# Altium footprint library Connectors.PcbLib: 120 footprints (part 4 of 8)
Each footprint in its own frame and in the unit in brackets; x right, y up, seen from the top. Pads: shape width x height; smd on the part's side, far side on the other; paste and mask are expansions set on the pad; w line width, h text height; cw(c..) or ccw(c..) is an arc to the next point about the centre after c.
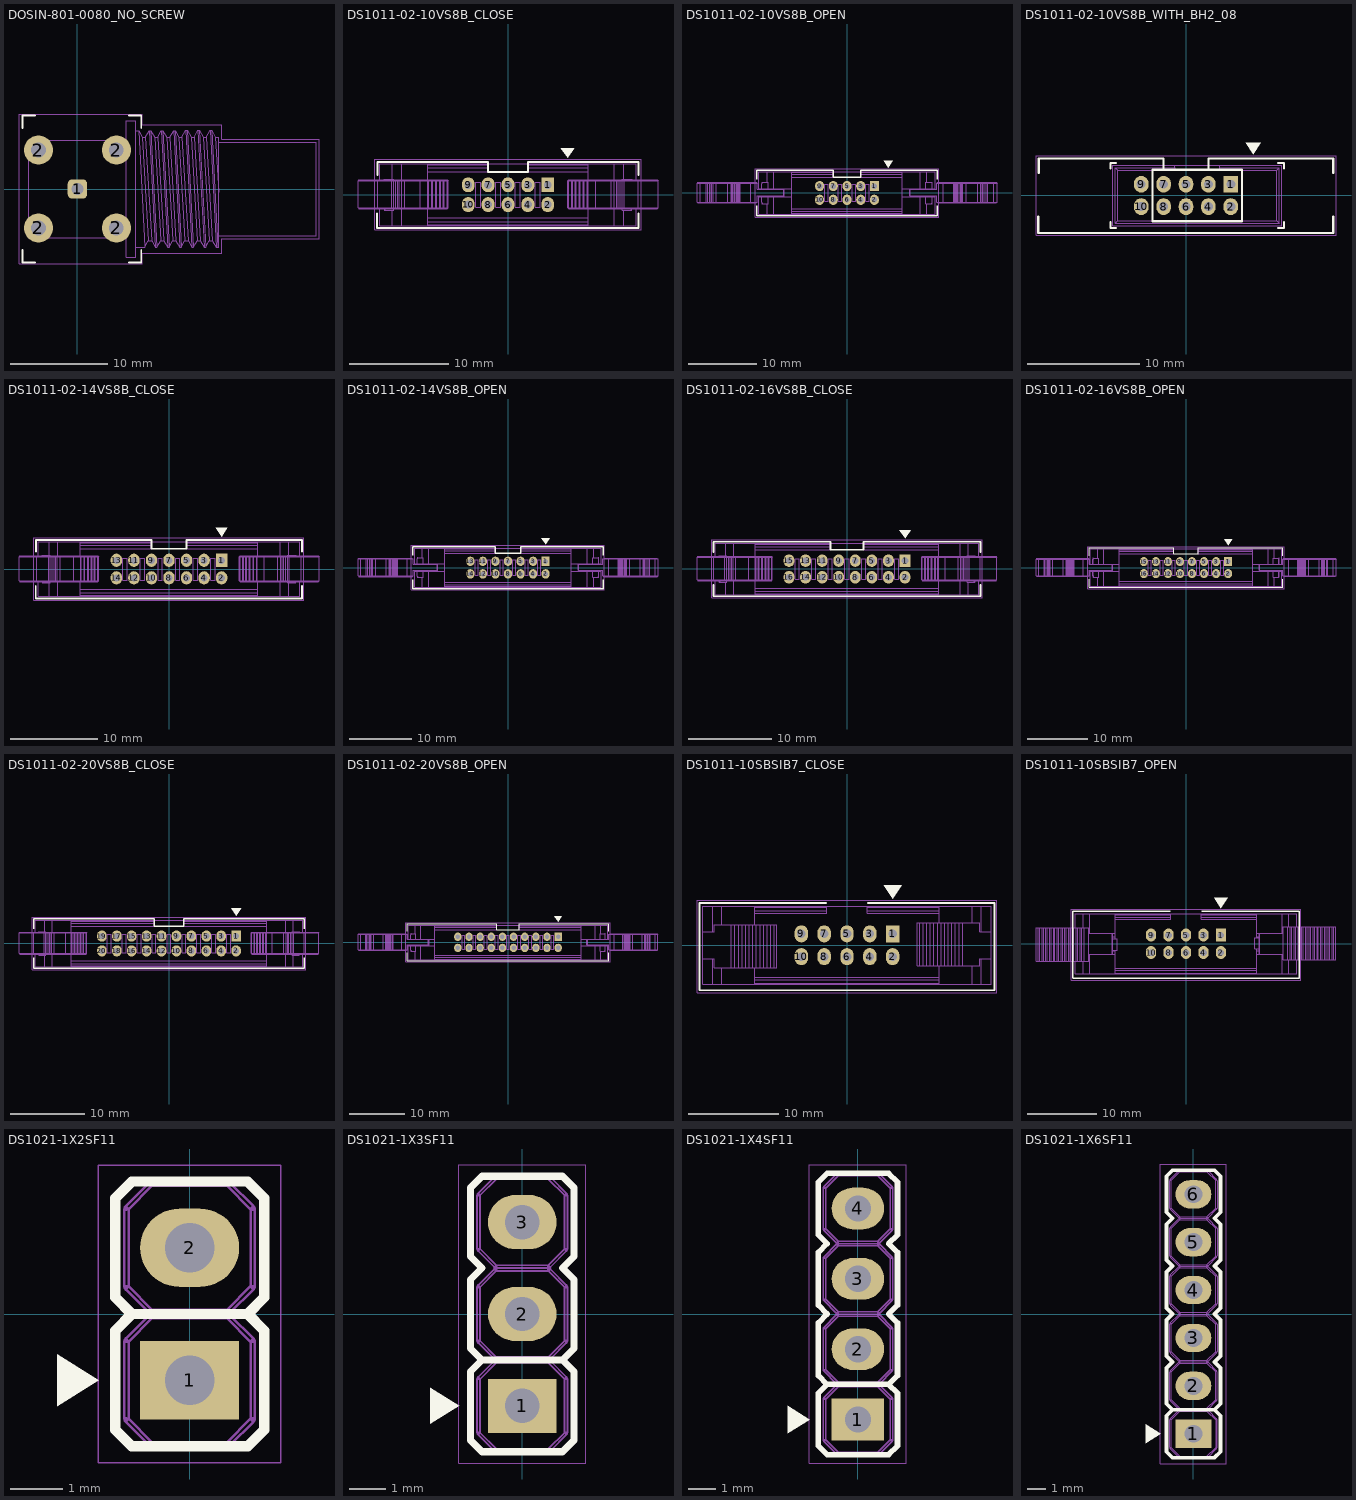
[diagram p3: the footprints below, top view; thin cyan lines are the x and y axes]

## DOSIN-801-0080_NO_SCREW [mm] "BNC Connector"
height 15
pads (5):
  rrect50% 2x2 hole 1.2: 1(0,0)
  round 3 hole 1.5: 2(-4,-4) 2(-4,4) 2(4,-4) 2(4,4)
Top Overlay:
  lines w0.2: -5.65,-6.28 -5.65,-7.55 -4.38,-7.55 ; -5.65,6.28 -5.65,7.55 -4.38,7.55 ; 5.28,-7.55 6.55,-7.55 6.55,-6.28 ; 5.28,7.55 6.55,7.55 6.55,6.28
Top Courtyard:
  lines w0.025: -6,-7.65 6.65,-7.65 6.65,-6.6 14.8,-6.6 14.8,-5.1 24.8,-5.1 24.8,5.1 14.8,5.1 14.8,6.6 6.65,6.6 6.65,7.65 -6,7.65 -6,-7.65
Top Assembly:
  lines w0.05: 5,-5 -5,-5 -5,5 5,5 ; 6,-6 6.906,-6 ; 6,6 6.281,6 ; 8.234,5.323 7.927,5.324 ; 9.483,5.325 9.176,5.326 ; 10.732,5.327 10.425,5.328 ; 11.98,5.33 11.674,5.33 ; 13.229,5.332 12.923,5.332 ; 14.178,5.323 14.484,5.323 ; 14.4,-5.99 13.775,6.01 ; 14.478,5.334 14.172,5.334 ; 14.5,-4.8 24.5,-4.8 24.5,4.8 14.5,4.8 ; 14.5,-0.434 14.5,5.306 ; 6.281,6 6.906,-6 ; 6.281,6 6.678,5.323 ; 6.678,5.323 7.295,-5.327 ; 6.678,5.323 6.976,5.323 ; 6.906,-6 7.295,-5.327 ; 6.976,5.323 7.605,-5.325 ; 6.976,5.323 7.375,6 ; 7.295,-5.327 7.605,-5.325 ; 7.375,6 8,-6 ; 7.375,6 7.531,6 ; 7.531,6 8.156,-6 ; 7.531,6 7.927,5.324 ; 7.605,-5.325 8,-6 ; 7.927,5.324 8.544,-5.329 ; 8,-6 8.156,-6 ; 8.156,-6 8.544,-5.329 ; 8.544,-5.329 8.853,-5.323 ; 8.624,6.002 9.249,-5.998 ; 8.624,6.002 8.225,5.325 8.853,-5.323 ; 8.624,6.002 8.78,6.002 ; 8.78,6.002 9.405,-5.998 ; 8.78,6.002 9.176,5.326 ; 8.853,-5.323 9.249,-5.998 ; 9.176,5.326 9.793,-5.327 ; 9.249,-5.998 9.405,-5.998 ; 9.405,-5.998 9.793,-5.327 ; 9.793,-5.327 10.102,-5.321 ; 9.872,6.004 10.498,-5.996 ; 9.872,6.004 9.473,5.327 10.102,-5.321 ; 9.872,6.004 10.029,6.004 ; 10.029,6.004 10.654,-5.996 ; 10.029,6.004 10.425,5.328 ; 10.102,-5.321 10.498,-5.996 ; 10.425,5.328 11.042,-5.325 ; 10.498,-5.996 10.654,-5.996 ; 10.654,-5.996 11.042,-5.325 ; 11.042,-5.325 11.351,-5.319 ; 11.121,6.006 11.746,-5.994 ; 11.121,6.006 10.722,5.33 11.351,-5.319 ; 11.121,6.006 11.278,6.006 ; 11.278,6.006 11.903,-5.994 ; 11.278,6.006 11.674,5.33 ; 11.351,-5.319 11.746,-5.994 ; 11.674,5.33 12.291,-5.323 ; 11.746,-5.994 11.903,-5.994 ; 11.903,-5.994 12.291,-5.323 ; 12.291,-5.323 12.6,-5.317 ; 12.37,6.008 12.995,-5.992 ; 12.37,6.008 11.971,5.332 12.6,-5.317 ; 12.37,6.008 12.526,6.008 ; 12.526,6.008 13.152,-5.992 ; 12.526,6.008 12.923,5.332 ; 12.6,-5.317 12.995,-5.992 ; 12.923,5.332 13.539,-5.321 ; 12.995,-5.992 13.152,-5.992 ; 13.152,-5.992 13.539,-5.321 ; 13.539,-5.321 13.849,-5.315 ; 13.619,6.01 14.244,-5.99 ; 13.619,6.01 13.22,5.334 13.849,-5.315 ; 13.619,6.01 13.775,6.01 ; 13.775,6.01 14.172,5.334 ; 13.849,-5.315 14.244,-5.99 ; 14.172,5.334 14.497,-0.357 14.497,-5.99 14.5,-5.99 14.244,-5.99 ; 5,-7 5,7 6,7 6,-7 5,-7
  text ".Designator" at 12.237,-0.679 h3
3D body "DOSIN-801-0080_NO_SCREW.x_t": height 16.8, standoff -4, extent -5,-7 24.5,7

## DS1011-02-10VS8B_CLOSE [mm]
pads (10):
  rect 1.3x1.5 hole 0.8: 1(4,1)
  oval 1.3x1.5 hole 0.8: 2(4,-1) 3(2,1) 4(2,-1) 5(0,1) 6(0,-1) 7(-2,1) 8(-2,-1) 9(-4,1) 10(-4,-1)
Top Overlay:
  region: 6,3.7 5.333,4.7 6.667,4.7
  lines w0.2: -13.2,-1.9 -13.2,-3.35 13.15,-3.35 13.15,-1.9 ; -13.15,2 -13.15,3.3 -2,3.3 -2,2.3 2,2.3 2,3.3 13.15,3.3 13.15,2
Top Courtyard:
  lines w0.025: -13.4,-3.55 13.4,-3.55 13.4,3.55 -13.4,3.55 -13.4,-3.55
Top Assembly:
  drawing of 381 lines, arcs and shapes, not listed
  text ".Designator" at -4.511,3.547 h2
3D body "DS1011-02-10VS8B_CLOSE.x_t": height 17.05, standoff -2.95, extent -15.093,-3.1 15.093,3.1

## DS1011-02-10VS8B_OPEN [mm]
pads (10):
  rect 1.3x1.5 hole 0.8: 1(4,1)
  oval 1.3x1.5 hole 0.8: 2(4,-1) 3(2,1) 4(2,-1) 5(0,1) 6(0,-1) 7(-2,1) 8(-2,-1) 9(-4,1) 10(-4,-1)
Top Overlay:
  region: 6,3.7 5.333,4.7 6.667,4.7
  lines w0.2: -13.2,-1.9 -13.2,-3.35 13.15,-3.35 13.15,-1.9 ; -13.15,2 -13.15,3.3 -2,3.3 -2,2.3 2,2.3 2,3.3 13.15,3.3 13.15,2
Top Courtyard:
  lines w0.025: -13.4,-3.55 -13.4,3.55 13.4,3.55 13.4,-3.55 -13.4,-3.55
Top Assembly:
  drawing of 391 lines, arcs and shapes, not listed
  text ".Designator" at -4.511,3.547 h2
3D body "DS1011-02-10VS8B_OPEN.x_t": height 14.99, standoff -2.95, extent -21.907,-3.1 21.907,3.1

## DS1011-02-10VS8B_WITH_BH2_08 [mm]
pads (10):
  rect 1.3x1.5 hole 0.8: 1(4,1)
  oval 1.3x1.5 hole 0.8: 2(4,-1) 3(2,1) 4(2,-1) 5(0,1) 6(0,-1) 7(-2,1) 8(-2,-1) 9(-4,1) 10(-4,-1)
Top Overlay:
  region: 6,3.7 5.333,4.7 6.667,4.7
  lines w0.2: -13.2,-1.9 -13.2,-3.35 13.15,-3.35 13.15,-1.9 ; -13.15,2 -13.15,3.3 -2,3.3 -2,2.3 2,2.3 2,3.3 13.15,3.3 13.15,2 ; -6.75,-2.4 -6.75,-2.9 -6.25,-2.9 ; -6.75,2.4 -6.75,2.9 -6.25,2.9 ; 8.25,-2.9 8.75,-2.9 8.75,-2.4 ; 8.25,2.9 8.75,2.9 8.75,2.4 ; -3,-2.3 -3,2.3 5,2.3 5,-2.3 -3,-2.3
Top Courtyard:
  lines w0.025: -13.4,-3.55 13.4,-3.55 13.4,3.55 -13.4,3.55 -13.4,-3.55
Top Assembly:
  drawing of 185 lines, arcs and shapes, not listed
  text ".Designator" at -4.511,3.547 h2
3D body "DS1014-08SF1B.x_t": height 5.65, standoff -2.45, extent -6.55,-2.7 8.55,2.7

## DS1011-02-14VS8B_CLOSE [mm]
pads (14):
  rect 1.3x1.5 hole 0.8: 1(6,1)
  oval 1.3x1.5 hole 0.8: 2(6,-1) 3(4,1) 4(4,-1) 5(2,1) 6(2,-1) 7(0,1) 8(0,-1) 9(-2,1) 10(-2,-1) 11(-4,1) 12(-4,-1) 13(-6,1) 14(-6,-1)
Top Overlay:
  region: 6,3.7 5.333,4.7 6.667,4.7
  lines w0.2: -15.2,-1.9 -15.2,-3.35 15.15,-3.35 15.15,-1.9 ; -15.15,2 -15.15,3.3 -2,3.3 -2,2.3 2,2.3 2,3.3 15.15,3.3 15.15,2
Top Courtyard:
  lines w0.025: -15.4,-3.55 15.35,-3.55 15.35,3.55 -15.4,3.55 -15.4,-3.55
Top Assembly:
  drawing of 453 lines, arcs and shapes, not listed
  text ".Designator" at -4.511,3.547 h2
3D body "DS1011-02-14VS8B(CLOSE).x_t": height 17.01, standoff -2.99, extent -17.093,-3.1 17.093,3.1

## DS1011-02-14VS8B_OPEN [mm]
pads (14):
  rect 1.3x1.5 hole 0.8: 1(6,1)
  oval 1.3x1.5 hole 0.8: 2(6,-1) 3(4,1) 4(4,-1) 5(2,1) 6(2,-1) 7(0,1) 8(0,-1) 9(-2,1) 10(-2,-1) 11(-4,1) 12(-4,-1) 13(-6,1) 14(-6,-1)
Top Overlay:
  region: 6,3.7 5.333,4.7 6.667,4.7
  lines w0.2: -15.2,-1.9 -15.2,-3.35 15.15,-3.35 15.15,-1.9 ; -15.15,2 -15.15,3.3 -2,3.3 -2,2.3 2,2.3 2,3.3 15.15,3.3 15.15,2
Top Courtyard:
  lines w0.025: -15.4,-3.55 15.35,-3.55 15.35,3.55 -15.4,3.55 -15.4,-3.55
Top Assembly:
  drawing of 463 lines, arcs and shapes, not listed
  text ".Designator" at -4.511,3.547 h2
3D body "DS1011-02-14VS8B(OPEN).x_t": height 14.95, standoff -2.99, extent -23.907,-3.1 23.907,3.1

## DS1011-02-16VS8B_CLOSE [mm]
pads (16):
  rect 1.3x1.5 hole 0.8: 1(7,1)
  oval 1.3x1.5 hole 0.8: 2(7,-1) 3(5,1) 4(5,-1) 5(3,1) 6(3,-1) 7(1,1) 8(1,-1) 9(-1,1) 10(-1,-1) 11(-3,1) 12(-3,-1) 13(-5,1) 14(-5,-1) 15(-7,1) 16(-7,-1)
Top Overlay:
  region: 7,3.7 6.333,4.7 7.667,4.7
  lines w0.2: -16.1,-1.9 -16.1,-3.3 16.1,-3.3 16.1,-1.9 ; -16.1,2 -16.1,3.3 -2,3.3 -2,2.3 2,2.3 2,3.3 16.1,3.3 16.1,2
Top Courtyard:
  lines w0.025: -16.3,-3.5 -16.3,3.5 16.3,3.5 16.3,-3.5 -16.3,-3.5
Top Assembly:
  drawing of 489 lines, arcs and shapes, not listed
  text ".Designator" at -4.511,3.547 h2
3D body "DS1011-02-16VS8B(CLOSE).x_t": height 17.01, standoff -2.99, extent -18.093,-3.1 18.093,3.1

## DS1011-02-16VS8B_OPEN [mm]
pads (16):
  rect 1.3x1.5 hole 0.8: 1(7,1)
  oval 1.3x1.5 hole 0.8: 2(7,-1) 3(5,1) 4(5,-1) 5(3,1) 6(3,-1) 7(1,1) 8(1,-1) 9(-1,1) 10(-1,-1) 11(-3,1) 12(-3,-1) 13(-5,1) 14(-5,-1) 15(-7,1) 16(-7,-1)
Top Overlay:
  region: 7,3.7 6.333,4.7 7.667,4.7
  lines w0.2: -16.1,-1.9 -16.1,-3.3 16.1,-3.3 16.1,-1.9 ; -16.1,2 -16.1,3.3 -2,3.3 -2,2.3 2,2.3 2,3.3 16.1,3.3 16.1,2
Top Courtyard:
  lines w0.025: -16.3,-3.5 -16.3,3.5 16.3,3.5 16.3,-3.5 -16.3,-3.5
Top Assembly:
  drawing of 499 lines, arcs and shapes, not listed
  text ".Designator" at -4.511,3.547 h2
3D body "DS1011-02-16VS8B(OPEN).x_t": height 14.95, standoff -2.99, extent -24.907,-3.1 24.907,3.1

## DS1011-02-20VS8B_CLOSE [mm]
pads (20):
  rect 1.3x1.5 hole 0.8: 1(9,1)
  oval 1.3x1.5 hole 0.8: 2(9,-1) 3(7,1) 4(7,-1) 5(5,1) 6(5,-1) 7(3,1) 8(3,-1) 9(1,1) 10(1,-1) 11(-1,1) 12(-1,-1) 13(-3,1) 14(-3,-1) 15(-5,1) 16(-5,-1) 17(-7,1) 18(-7,-1) 19(-9,1) 20(-9,-1)
Top Overlay:
  region: 9,3.7 8.333,4.7 9.667,4.7
  lines w0.2: -18.1,-1.9 -18.1,-3.3 18.1,-3.3 18.1,-1.9 ; -18.1,2 -18.1,3.3 -2,3.3 -2,2.3 2,2.3 2,3.3 18.1,3.3 18.1,2
Top Courtyard:
  lines w0.025: -18.3,-3.5 18.3,-3.5 18.3,3.5 -18.3,3.5 -18.3,-3.5
Top Assembly:
  drawing of 561 lines, arcs and shapes, not listed
  text ".Designator" at -4.511,3.547 h2
3D body "DS1011-02-20VS8B(CLOSE).x_t": height 17.01, standoff -2.99, extent -20.093,-3.1 20.093,3.1

## DS1011-02-20VS8B_OPEN [mm]
pads (20):
  rect 1.3x1.5 hole 0.8: 1(9,1)
  oval 1.3x1.5 hole 0.8: 2(9,-1) 3(7,1) 4(7,-1) 5(5,1) 6(5,-1) 7(3,1) 8(3,-1) 9(1,1) 10(1,-1) 11(-1,1) 12(-1,-1) 13(-3,1) 14(-3,-1) 15(-5,1) 16(-5,-1) 17(-7,1) 18(-7,-1) 19(-9,1) 20(-9,-1)
Top Overlay:
  region: 9,3.7 8.333,4.7 9.667,4.7
  lines w0.2: -18.1,-1.9 -18.1,-3.3 18.1,-3.3 18.1,-1.9 ; -18.1,2 -18.1,3.3 -2,3.3 -2,2.3 2,2.3 2,3.3 18.1,3.3 18.1,2
Top Courtyard:
  lines w0.025: -18.3,-3.5 -18.3,3.5 18.3,3.5 18.3,-3.5 -18.3,-3.5
Top Assembly:
  drawing of 571 lines, arcs and shapes, not listed
  text ".Designator" at -4.511,3.547 h2
3D body "DS1011-02-20VS8B(OPEN).x_t": height 14.95, standoff -2.99, extent -26.907,-3.1 26.907,3.1

## DS1011-10SBSIB7_CLOSE [mm] "DS1011-10S CONNFLY"
pads (10):
  rect 1.5x1.9 hole 0.95: 1(5.08,1.27)
  oval 1.5x1.9 hole 0.95: 2(5.08,-1.27) 3(2.54,1.27) 4(2.54,-1.27) 5(0,1.27) 6(0,-1.27) 7(-2.54,1.27) 8(-2.54,-1.27) 9(-5.08,1.27) 10(-5.08,-1.27)
Top Overlay:
  region: 5.08,5.2 4.08,6.7 6.08,6.7
  lines w0.2: -16.42,-5 -16.42,4.7 -2.3,4.7 ; -16.4,-5 -0.92,-5 16.42,-5 16.42,4.7 2.3,4.7
Top Courtyard:
  lines w0.025: -16.7,-5.3 16.7,-5.3 16.7,5 -16.7,5 -16.7,-5.3
Top Assembly:
  drawing of 234 lines, arcs and shapes, not listed
  text ".Designator" at -4.511,5.047 h2
3D body "DS1011-10_CLOSE.x_t": height 27.93, standoff -3.1, extent -16.07,-4.35 16.03,4.35

## DS1011-10SBSIB7_OPEN [mm] "DS1011-10S CONNFLY"
pads (10):
  rect 1.5x1.9 hole 0.95: 1(5.08,1.27)
  oval 1.5x1.9 hole 0.95: 2(5.08,-1.27) 3(2.54,1.27) 4(2.54,-1.27) 5(0,1.27) 6(0,-1.27) 7(-2.54,1.27) 8(-2.54,-1.27) 9(-5.08,1.27) 10(-5.08,-1.27)
Top Overlay:
  region: 5.08,5.2 4.08,6.7 6.08,6.7
  lines w0.2: -16.42,-5 -16.42,4.7 -2.3,4.7 ; -16.4,-5 -0.92,-5 16.42,-5 16.42,4.7 2.3,4.7
Top Courtyard:
  lines w0.025: -16.7,-5.3 16.7,-5.3 16.7,5 -16.7,5 -16.7,-5.3
Top Assembly:
  drawing of 272 lines, arcs and shapes, not listed
  text ".Designator" at -4.511,5.047 h2
3D body "DS1011-10_OPEN.x_t": height 25.38, standoff -3.1, extent -21.805,-4.35 21.766,4.35

## DS1021-1X2SF11 [mm] "PLS-4 Connector, A = 3mm, B = 6.1mm"
pads (2):
  rect 1.9x1.5 hole 0.95: 1(0,-1.27)
  oval 1.9x1.5 hole 0.95: 2(0,1.27)
Top Overlay:
  region: -1.746,-1.27 -2.54,-0.774 -2.54,-1.766
  lines w0.2: -1.111,0 -1.429,-0.318 -1.429,-2.222 -1.111,-2.54 1.111,-2.54 1.429,-2.222 1.429,-0.317 1.111,0 ; -1.111,0 -1.429,0.318 -1.429,2.222 -1.111,2.54 1.111,2.54 1.429,2.223 1.429,0.318 1.111,0 ; -1.111,0 1.111,0
Top Courtyard:
  lines w0.025: -1.75,-2.85 1.75,-2.85 1.75,-2.25 1.75,2.85 -1.75,2.85 -1.75,-2.85
Top Assembly:
  drawing of 257 lines, arcs and shapes, not listed
  text ".Designator" at 2.993,-4.511 h2
3D body "User Library-PLS-2.step": height 8.54, standoff -3, extent -1.27,-2.54 1.27,2.54

## DS1021-1X3SF11 [mm] "PLS-4 Connector, A = 3mm, B = 6.1mm"
pads (3):
  rect 1.9x1.5 hole 0.95: 1(0,-2.54)
  oval 1.9x1.5 hole 0.95: 2(0,0) 3(0,2.54)
Top Overlay:
  region: -1.746,-2.54 -2.54,-2.044 -2.54,-3.036
  lines w0.2: -1.111,-1.27 -1.429,-1.587 -1.429,-3.492 -1.111,-3.81 1.111,-3.81 1.429,-3.492 1.429,-1.587 1.111,-1.27 ; -1.111,-1.27 -1.429,-0.953 -1.429,0.953 -1.111,1.27 -1.429,1.587 -1.429,3.492 -1.111,3.81 1.111,3.81 1.429,3.493 1.429,1.588 1.111,1.27 1.429,0.953 1.429,-0.952 1.111,-1.27 ; -1.111,-1.27 1.111,-1.27
Top Courtyard:
  lines w0.025: -1.75,-4.12 1.75,-4.12 1.75,4.12 -1.75,4.12 -1.75,-4.12
Top Assembly:
  drawing of 385 lines, arcs and shapes, not listed
  text ".Designator" at 2.993,-4.511 h2
3D body "1x3 TH Pitch 2_54mm.X_T": height 9.2, standoff -3.5, extent -1.27,-3.81 1.27,3.81

## DS1021-1X4SF11 [mm] "PLS-4 Connector, A = 3mm, B = 6.1mm"
pads (4):
  rect 1.9x1.5 hole 0.95: 1(0,-3.81)
  oval 1.9x1.5 hole 0.95: 2(0,-1.27) 3(0,1.27) 4(0,3.81)
Top Overlay:
  region: -1.746,-3.81 -2.54,-3.314 -2.54,-4.306
  lines w0.2: -1.111,-2.54 -1.429,-2.857 -1.429,-4.763 -1.111,-5.08 1.111,-5.08 1.429,-4.762 1.429,-2.857 1.111,-2.54 ; -1.111,-2.54 -1.429,-2.222 -1.429,-0.318 -1.111,0 -1.429,0.318 -1.429,2.222 -1.111,2.54 -1.429,2.857 -1.429,4.763 -1.111,5.08 1.111,5.08 1.429,4.763 1.429,2.858 1.111,2.54 1.429,2.223 1.429,0.318 1.111,0 1.429,-0.317 1.429,-2.222 1.111,-2.54 ; -1.111,-2.54 1.111,-2.54
Top Courtyard:
  lines w0.025: -1.75,-5.39 1.75,-5.39 1.75,5.39 -1.75,5.39 -1.75,-5.39
Top Assembly:
  drawing of 513 lines, arcs and shapes, not listed
  text ".Designator" at 2.993,-4.511 h2
3D body "1x4 TH Pitch 2_54mm.X_T": height 9.2, standoff -3.5, extent -1.27,-5.08 1.27,5.08

## DS1021-1X6SF11 [mm] "PLS-6 Connector, A = 3mm, B = 6.1mm"
pads (6):
  rect 1.9x1.5 hole 0.95: 1(0,-6.35)
  oval 1.9x1.5 hole 0.95: 2(0,-3.81) 3(0,-1.27) 4(0,1.27) 5(0,3.81) 6(0,6.35)
Top Overlay:
  region: -1.746,-6.35 -2.54,-5.854 -2.54,-6.846
  lines w0.2: -1.111,-5.08 -1.429,-5.397 -1.429,-7.302 -1.111,-7.62 1.111,-7.62 1.429,-7.302 1.429,-5.397 1.111,-5.08 ; -1.111,-5.08 -1.429,-4.763 -1.429,-2.857 -1.111,-2.54 -1.429,-2.222 -1.429,-0.318 -1.111,0 -1.429,0.318 -1.429,2.222 -1.111,2.54 -1.429,2.857 -1.429,4.763 -1.111,5.08 -1.429,5.397 -1.429,7.302 -1.111,7.62 1.111,7.62 1.429,7.303 1.429,5.398 1.111,5.08 1.429,4.763 1.429,2.858 1.111,2.54 1.429,2.223 1.429,0.318 1.111,0 1.429,-0.317 1.429,-2.222 1.111,-2.54 1.429,-2.857 1.429,-4.762 1.111,-5.08 ; -1.111,-5.08 1.111,-5.08
Top Courtyard:
  lines w0.025: -1.75,-7.93 1.75,-7.93 1.75,7.93 -1.75,7.93 -1.75,-7.93
Top Assembly:
  drawing of 769 lines, arcs and shapes, not listed
  text ".Designator" at 2.993,-4.511 h2
3D body "1x6 TH Pitch 2_54mm.X_T": height 9.2, standoff -3.5, extent -1.27,-7.62 1.27,7.62